# Altium schematic symbol library ERA6AED510V.SchLib: 1 symbol
Pins are listed as number, name and electrical type; pins without a type are passive.

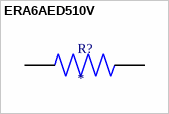
[diagram p0: symbol ERA6AED510V]

## ERA6AED510V
designator R?
51 Ohms ±0.5% 0.125W, 1/8W Chip Resistor 0805 (2012 Metric) Automotive AEC-Q200 Thin Film; MP: ERA6AED510V; Availability: Unavailable; Value: *; Price: None; Package: None; ComponentLink1Description: Digikey link; ComponentLink1URL: https://www.digikey.com/en/products/detail/panasonic-industry/ERA-6AED510V/9373663
footprint RES_ERA6AED510V
footprint RES_ERA6AED510V
pins: 1, 2